# Altium schematic symbol library 2020-06-18_15-16-30.SchLib: 2 symbols
Pins are listed as number, name and electrical type; pins without a type are passive.

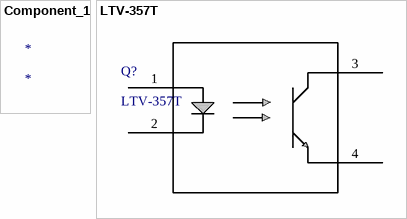
[diagram p0: symbols Component_1 to LTV-357T]

## Component_1
designator *

## LTV-357T
designator Q?
No Description Available; Vendor: Lite-On; Built_By: EMA_Cory; SourceLibrary: LITE-ON_2020-05-08; Type: DEV; Datasheet: https://optoelectronics.liteon.com/upload/download/DS70-2001-012/LTV-357T%20series%20201606.pdf; Manufacturer_Part_Number: LTV-357T; Copyright: Copyright (C) 2018 Accelerated Designs. All rights reserved; RefDes: RefDes
footprint LTV-357T_LTO
pins: 1, 2, 3, 4